# Altium schematic symbol library aksima_ugo.SchLib: 37 symbols
Pins are listed as number, name and electrical type; pins without a type are passive.

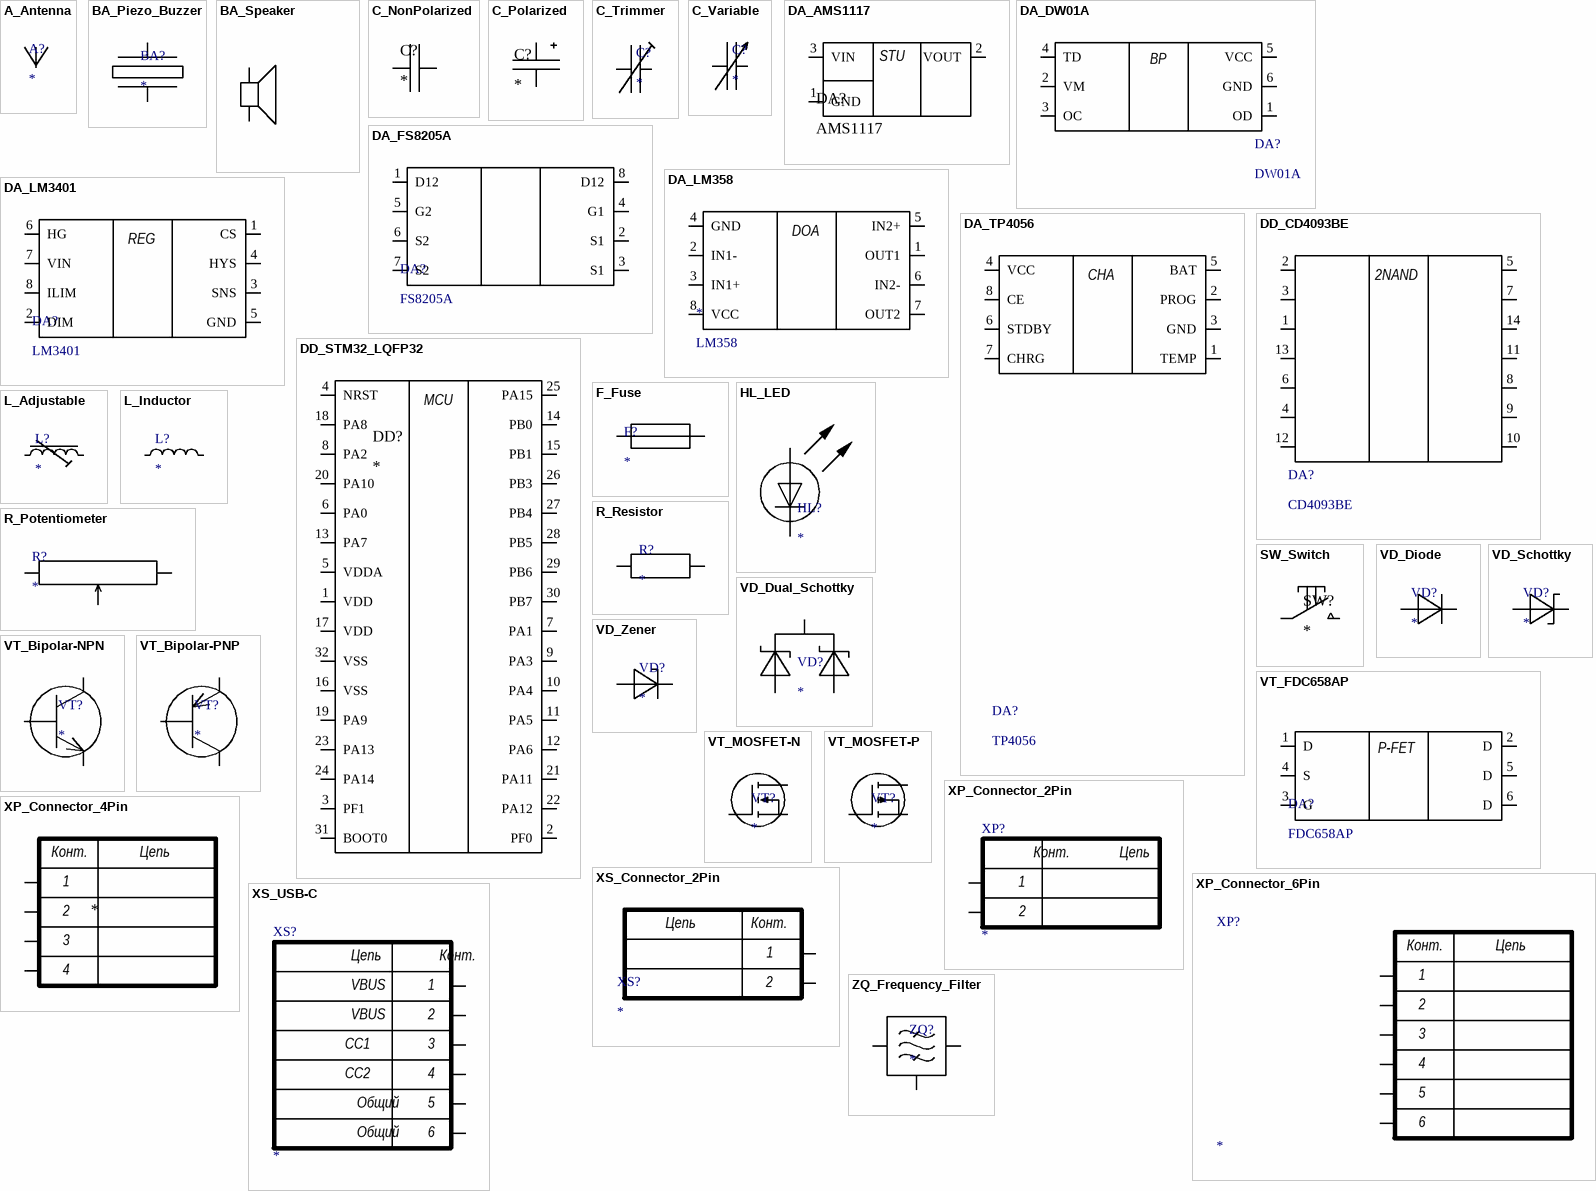
[diagram p0: symbols A_Antenna to ZQ_Frequency_Filter]

## A_Antenna
designator A?
Antenna; Value: *
footprint Antenna
pins: 1

## BA_Piezo_Buzzer
designator BA?
Piezoelectric buzzer; Value: *
pins: 1, 2

## BA_Speaker
designator BA
Loudspeaker; Value: *
pins: 1, 2

## C_NonPolarized
designator C?
Non-polarized capacitor; Value: *
footprint 1206_capacitor
footprint CAP 0805_2012 RF (Chip Capacitor, 2-Leads, Body 2.00x1.20mm, IPC High Density)
pins: 1, 2

## C_Polarized
designator C?
Polarized capacitor; Value: *
footprint KM50-35(+)
footprint CAP ALSMD 6.6MM H5.4MM (Aluminum Electrolytic Capacitor, Body 6.60x6.60x5.40mm, IPC Low Density)
pins: 1, 2

## C_Trimmer
designator C?
Trimmer capacitor; Value: *
footprint Variable capacitor
pins: 1, 2

## C_Variable
designator C?
Variable capacitor; Value: *
footprint Variable capacitor
pins: 1, 2

## DA_AMS1117
designator DA?, comment AMS1117
Linear voltage regulator; Value: AMS1117
footprint sot223_asm1117
pins: 1 GND, 2 VOUT, 3 VIN
text: STU

## DA_DW01A
designator DA?, comment DW01A
Single-cell lithium-ion battery protection IC; Value: DW01A
footprint SOT23-6 (SOT143-4 per SP0503BAHTG (WRONG PIN ORDER))
pins: 1 OD, 2 VM, 3 OC, 4 TD, 5 VCC, 6 GND
text: BP

## DA_FS8205A
designator DA?, comment FS8205A
Dual N-channel MOSFET; Value: FS8205A
footprint Atmel TSSOP-8 8X (TSSOP, 8-Leads, Body 3.00x4.40mm, Pitch 0.65mm, IPC Medium Density)
pins: 1 D12, 2 S1, 3 S1, 4 G1, 5 G2, 6 S2, 7 S2, 8 D12

## DA_LM358
designator *, comment LM358
Dual operational amplifier; Value: LM358
pins: 1 OUT1, 2 IN1-, 3 IN1+, 4 GND, 5 IN2+, 6 IN2-, 7 OUT2, 8 VCC
text: DOA

## DA_LM3401
designator DA?, comment LM3401
Hysteretic LED driver controller; Value: LM3401
footprint MSOP8
pins: 1 CS, 2 DIM, 3 SNS, 4 HYS, 5 GND, 6 HG, 7 VIN, 8 ILIM
text: REG

## DA_TP4056
designator DA?, comment TP4056
Single-cell lithium-ion battery charger; Value: TP4056
footprint TP4056
pins: 1 TEMP, 2 PROG, 3 GND, 4 VCC, 5 BAT, 6 STDBY, 7 CHRG, 8 CE
text: CHA

## DD_CD4093BE
designator DA?, comment CD4093BE
Quad two-input Schmitt-trigger NAND gate; Value: CD4093BE
pins: 1, 2, 3, 4, 5, 6, 7, 8, 9, 10, 11, 12, 13, 14
text: 2NAND

## DD_STM32_LQFP32
designator DD?
STM32 microcontroller; Value: *
footprint LQFP32_STM32
pins: 1 VDD, 2 PF0, 3 PF1, 4 NRST, 5 VDDA, 6 PA0, 7 PA1, 8 PA2, 9 PA3, 10 PA4, 11 PA5, 12 PA6, 13 PA7, 14 PB0, 15 PB1, 16 VSS, 17 VDD, 18 PA8, 19 PA9, 20 PA10, 21 PA11, 22 PA12, 23 PA13, 24 PA14, 25 PA15, 26 PB3, 27 PB4, 28 PB5, 29 PB6, 30 PB7, 31 BOOT0, 32 VSS
text: MCU

## F_Fuse
designator F?
Fuse; Value: *
footprint 1206_fusE
pins: 1, 2

## HL_LED
designator HL?
Light-emitting diode; Value: *
footprint LED_RED
pins: 1, 2

## L_Adjustable
designator L?
Inductor with adjustable core; Value: *
footprint Inductor MP
pins: 1, 2

## L_Inductor
designator L?
Inductor; Value: *
footprint INDUCTOR_1208
pins: 1, 2

## R_Potentiometer
designator R?
Potentiometer; Value: *
footprint Potentiometr (50K)
pins: 1, 2, 3

## R_Resistor
designator R?
Fixed resistor; Value: *
footprint 1206_resistor
footprint C2-23_RESISTOR
footprint RES 2512_6432 (Chip Resistor, 2-Leads, Body 6.30x3.15mm, IPC Medium Density)
footprint RES 0805_2012 (Chip Resistor, 2-Leads, Body 2.00x1.25mm, IPC Medium Density)
pins: 1, 2

## SW_Switch
designator SW?
Switch; Value: *
footprint button
pins: 1, 2

## VD_Diode
designator VD?
Diode; Value: *
footprint 1N4148
pins: 1, 2

## VD_Dual_Schottky
designator VD?
Dual Schottky diode; Value: *
pins: 1 A1, 2 K, 3 A2

## VD_Schottky
designator VD?
Schottky rectifier; Value: *
footprint DO214AC SMA (Molded Diode, 2-Leads, Body 4.30x2.60mm, IPC Medium Density)
footprint DO214AB SMC (Molded Diode, 2-Leads, Body 6.85x5.90mm, IPC Medium Density)
pins: 1, 2

## VD_Zener
designator VD?
Zener diode; Value: *
pins: 1, 2

## VT_Bipolar-NPN
designator VT?
NPN bipolar transistor; Value: *
footprint KT315B_KT-13
pins: 1 Б, 2 К, 3 Э

## VT_Bipolar-PNP
designator VT?
PNP bipolar transistor; Value: *
footprint KT361B_KT-13
pins: 1 Б, 2 К, 3 Э

## VT_FDC658AP
designator DA?, comment FDC658AP
P-channel power MOSFET; Value: FDC658AP
footprint TI TSOT-23-6 (TSOT23, 6-Leads, Body 2.90x2.80mm, Pitch 0.95mm, IPC High Density)
pins: 1 D, 2 D, 3 G, 4 S, 5 D, 6 D
text: P-FET

## VT_MOSFET-N
designator VT?
N-channel MOSFET; Value: *
footprint sot23_transistor
pins: 1 И, 2 З, 3 С

## VT_MOSFET-P
designator VT?
P-channel MOSFET; Value: *
footprint sot23_transistor
pins: 1 И, 2 З, 3 С

## XP_Connector_2Pin
designator XP?
2-pin connector (plug); Value: *
footprint MW-2M
pins: 1, 2
text: Конт.; Цепь

## XP_Connector_4Pin
designator XP?
4-pin connector (plug); Value: *
footprint arduino_pin_4
pins: 1, 2, 3, 4
text: Конт.; Цепь

## XP_Connector_6Pin
designator XP?
6-pin connector (plug); Value: *
pins: 1, 2, 3, 4, 5, 6
text: Конт.; Цепь

## XS_Connector_2Pin
designator XS?
2-pin connector (socket); Value: *
footprint CWF_2R
footprint MW-2M
pins: 1, 2
text: Цепь; Конт.

## XS_USB-C
designator XS?
USB Type-C receptacle; Value: *
footprint USB-C 6 pins
pins: C1, C2, C3, C4, C5, C6
text: Цепь; Конт.; VBUS; 1; 2; CC1; 3; CC2; 4; Общий; 5; 6

## ZQ_Frequency_Filter
designator ZQ?
Frequency filter; Value: *
footprint piezofilter
pins: 1, 2, 3